# Altium footprint library DIPS1524W40P762L960H620Q4N.PcbLib: 1 footprints
Each footprint in its own frame and in the unit in brackets; x right, y up, seen from the top. Pads: shape width x height; smd on the part's side, far side on the other; paste and mask are expansions set on the pad; w line width, h text height; cw(c..) or ccw(c..) is an arc to the next point about the centre after c.
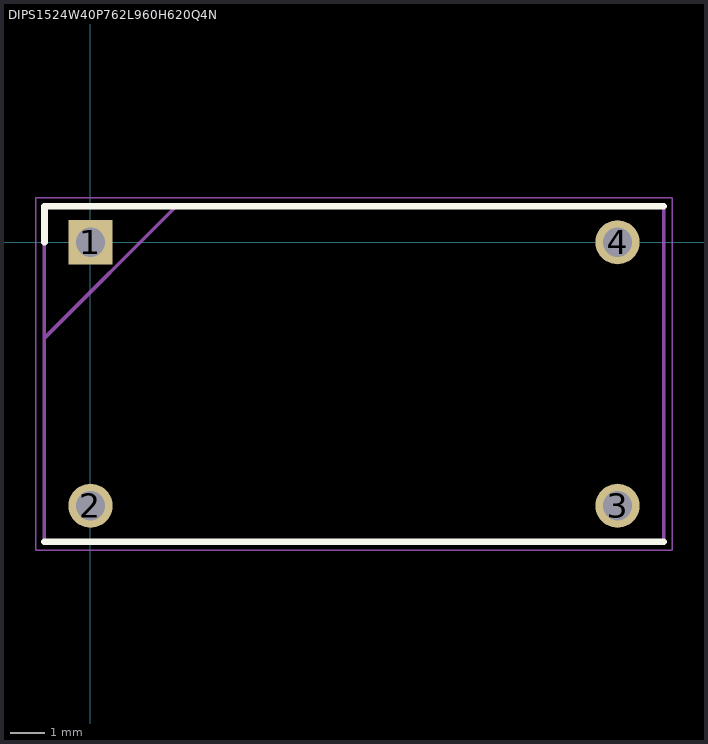
[diagram p0: the footprint, top view; thin cyan lines are the x and y axes]

## DIPS1524W40P762L960H620Q4N [mm]
pads (4):
  rect 1.275x1.275 / inner round 1.275 / far side rect 1.275x1.275 hole 0.85: 1(0,0)
  round 1.275 hole 0.85: 2(0,-7.62) 3(15.24,-7.62) 4(15.24,0)
Top Overlay:
  lines w0.2: -1.33,-8.66 16.57,-8.66 ; -1.33,0 -1.33,1.04 16.57,1.04
Mechanical 15:
  lines w0.1: -1.33,-2.77 2.48,1.04 ; -1.33,-8.66 16.57,-8.66 16.57,1.04 -1.33,1.04 -1.33,-8.66
Mechanical 20:
  lines w0.05: -1.58,-8.91 16.82,-8.91 16.82,1.29 -1.58,1.29 -1.58,-8.91